# Altium schematic symbol library Centralize.SchLib: 1081 symbols (part 14 of 26)
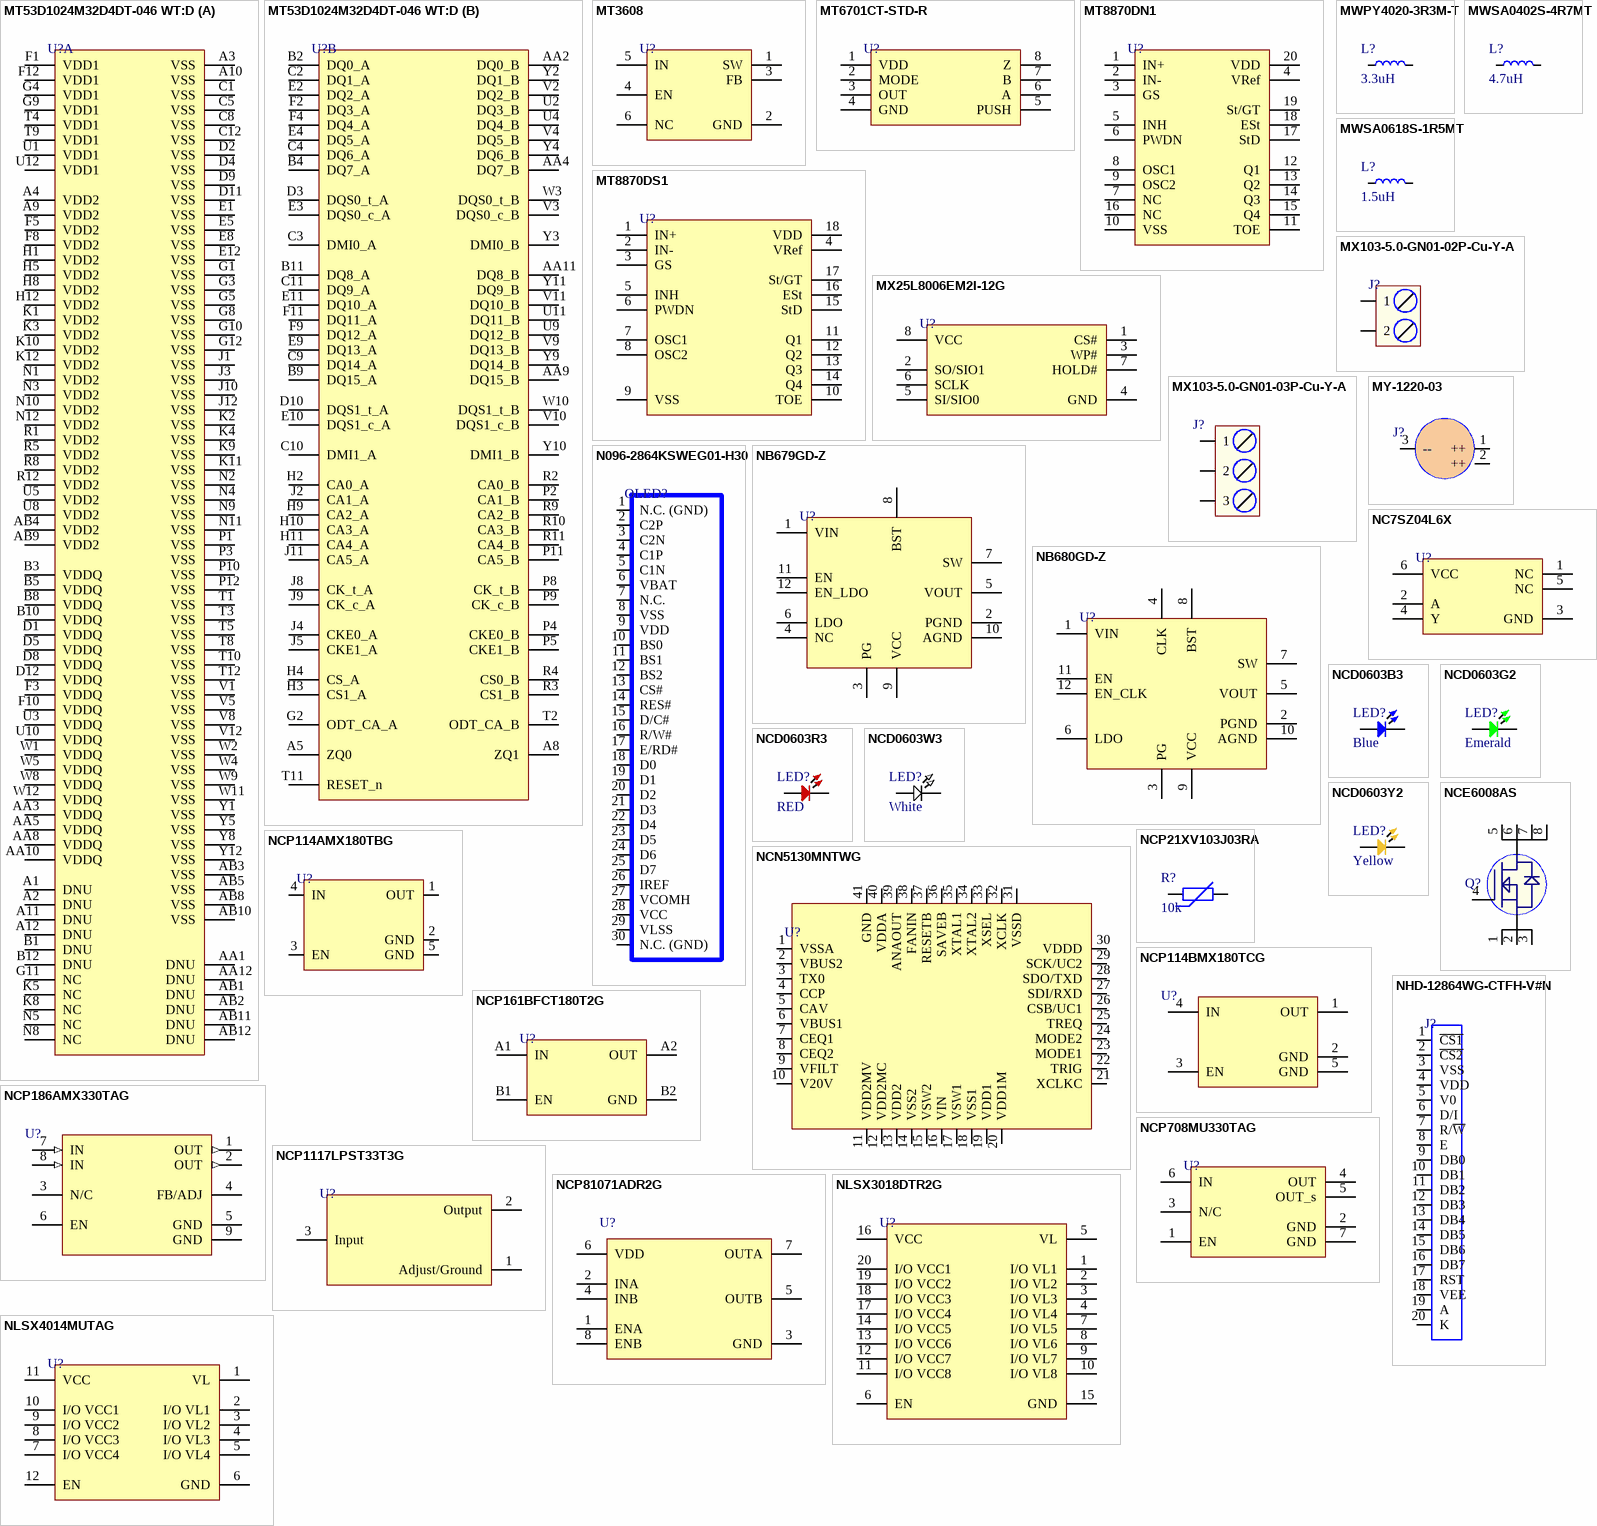
[diagram p60: symbols MT53D1024M32D4DT-046 WT:D to NLSX4014MUTAG]

## NCD0603G2
designator LED?, comment Emerald
Emerald 0603 Light Emitting Diodes (LED) ROHS; Manufacturer: Foshan NationStar Optoelectronics; Manufacturer Part Number: NCD0603G2; Package: 0603; LCSC Part Number: C87326; Item Type: LED; ComponentLink1Description: LCSC; ComponentLink1URL: https://www.lcsc.com/product-detail/Light-Emitting-Diodes-LED_Foshan-NationStar-Optoelectronics-NCD0603G2_C87326.html
footprint LED-0603
pins: 1, 2

## NCD0603R3
designator LED?, comment RED
RED LED 0603 Light Emitting Diodes; Manufacturer: Foshan NationStar Optoelectronics; Manufacturer Part Number: NCD0603R3; Package: 0603; Item Type: LED; LCSC Part Number: C3151730; ComponentLink1Description: LCSC; ComponentLink1URL: https://www.lcsc.com/product-detail/Light-Emitting-Diodes-LED_Foshan-NationStar-Optoelectronics-NCD0603R3_C3151730.html
footprint LED-0603
pins: 1, 2

## NCD0603W3
designator LED?, comment White
White light 0603 Light Emitting Diodes (LED) ROHS; Manufacturer: Foshan NationStar Optoelectronics; Manufacturer Part Number: NCD0603W3; Package: 0603; LCSC Part Number: C158100; Item Type: LED; ComponentLink1Description: LCSC; ComponentLink1URL: https://www.lcsc.com/product-detail/Light-Emitting-Diodes-LED_Foshan-NationStar-Optoelectronics-NCD0603W3_C158100.html
footprint LED-0603
pins: 1, 2

## NCD0603Y2
designator LED?, comment Yellow
yellow 0603 Light Emitting Diodes (LED) ROHS; Manufacturer: Foshan NationStar Optoelectronics; Manufacturer Part Number: NCD0603Y2; Package: 0603; LCSC Part Number: C89811; Item Type: LED; ComponentLink1Description: LCSC; ComponentLink1URL: https://www.lcsc.com/product-detail/Light-Emitting-Diodes-LED_Foshan-NationStar-Optoelectronics-NCD0603Y2_C89811.html
footprint LED-0603
pins: 1, 2

## NCE6008AS
designator Q?
60V 8A 2.1W 20mΩ@10V,8A 2.2V@250uA N Channel SOP-8 MOSFETs ROHS; Manufacturer: Wuxi; Manufacturer Part Number: NCE6008AS; Package: SOP-8; ComponentLink1Description: LCSC; ComponentLink1URL: https://www.lcsc.com/product-detail/MOSFETs_Wuxi-span-style-background-color-ff0-NCE-span-Power-Semiconductor-NCE6008AS_C341716.html; LCSC Part Number: C341716
footprint SOP-8
pins: 1 S, 2 S, 3 S, 4 G, 5 D, 6 D, 7 D, 8 D

## NCN5130MNTWG
designator U?
IC TRANSCEIVER FULL 1/1 40QFN; Manufacturer: ON Semiconductor; Manufacturer Part Number: NCN5130MNTWG; Simplex/Duplex: Full Duplex; Supplier: Mouser; Supplier Part Number: 863-NCN5130MNTWG; RoHS: Yes; Category: Buffers, Drivers and Transceivers; Stock: 36; Pricing: 1=6.82, 10=6.16, 50=5.88, 100=4.78, 1000=3.66, 10000=3.51 (USD); Mounting Technology: Surface Mount; Case/Package: QFN; Min Operating Temperature: -40°C; Max Operating Temperature: 105°C; Packaging: Cut Tape; Series: -; Lead Free: Lead Free; RoHS Compliant: Yes; ComponentLink1URL: http://www.onsemi.com/pub/Collateral/NCN5130-D.PDF?src-supplier=Digi-Key; ComponentLink1Description: http://www.onsemi.com/pub/Collateral/NCN5130-D.PDF?src-supplier=Digi-Key; Item Type: IC
footprint 40-QFN (6x6)
pins: 1 VSSA, 2 VBUS2, 3 TX0, 4 CCP, 5 CAV, 6 VBUS1, 7 CEQ1, 8 CEQ2, 9 VFILT, 10 V20V, 11 VDD2MV, 12 VDD2MC, 13 VDD2, 14 VSS2, 15 VSW2, 16 VIN, 17 VSW1, 18 VSS1, 19 VDD1, 20 VDD1M, 21 XCLKC, 22 TRIG, 23 MODE1, 24 MODE2, 25 TREQ, 26 CSB/UC1, 27 SDI/RXD, 28 SDO/TXD, 29 SCK/UC2, 30 VDDD, 31 VSSD, 32 XCLK, 33 XSEL, 34 XTAL2, 35 XTAL1, 36 SAVEB, 37 RESETB, 38 FANIN, 39 ANAOUT, 40 VDDA, 41 GND

## NCP21XV103J03RA
designator R?, comment 10k
THERMISTOR NTC 10KOHM 3900K 0805; Manufacturer: Murata Electronics; Manufacturer Part Number: NCP21XV103J03RA; Package: 0805; LCSC Part Number: C73681; Item Type: Thermistor; ComponentLink8Description: LCSC; ComponentLink8URL: https://www.lcsc.com/product-detail/NTC-Thermistors_Murata-Electronics-NCP21XV103J03RA_C73681.html
footprint RES-0805 (SMD 0805)
pins: 1, 2

## NCP114AMX180TBG
designator U?
IC REG LINEAR 1.8V 300MA 4UDFN; Manufacturer: ON Semiconductor; Manufacturer Part Number: NCP114AMX180TBG; Number of Regulators: 1; Supplier: Avnet; Supplier Part Number: NCP114AMX180TBG; RoHS: Yes; Category: Voltage Regulators - Linear; Stock: 515000; Pricing: 5939=0.06231, 6000=0.06062, 12000=0.05894, 30000=0.05726, 60000=0.05557, 300000=0.05389, 600000=0.0522 (USD); Mounting Technology: Surface Mount; Case/Package: 300; Min Operating Temperature: -40°C; Max Operating Temperature: 85°C; Packaging: Tape and Reel; Output Voltage: 1.8V; Output Current: 300mA; Min Current Limit: 300mA; Series: -; Lead Free: Lead Free; RoHS Compliant: Yes; ComponentLink1URL: http://www.mouser.com/ds/2/308/NCP114-D-465957.pdf?src-supplier=Mouser; ComponentLink1Description: http://www.mouser.com/ds/2/308/NCP114-D-465957.pdf?src-supplier=Mouser; ComponentLink2URL: https://datasheet.octopart.com/NCP114AMX180TBG-ON-Semiconductor-datasheet-138898170.pdf?src-supplier=Newark; ComponentLink2Description: https://datasheet.octopart.com/NCP114AMX180TBG-ON-Semiconductor-datasheet-138898170.pdf?src-supplier=Newark; ComponentLink3URL: https://datasheet.octopart.com/NCP114AMX180TBG-ON-Semiconductor-datasheet-37176940.pdf?src-supplier=Future+Electronics; ComponentLink3Description: https://datasheet.octopart.com/NCP114AMX180TBG-ON-Semiconductor-datasheet-37176940.pdf?src-supplier=Future+Electronics; ComponentLink4URL: http://www.onsemi.com/pub/Collateral/NCP114-D.PDF?src-supplier=Digi-Key; ComponentLink4Description: http://www.onsemi.com/pub/Collateral/NCP114-D.PDF?src-supplier=Digi-Key; ComponentLink5URL: https://datasheet.octopart.com/NCP114AMX180TBG-onsemi-datasheet-66421349.pdf?src-supplier=SHENGYU+ELECTRONICS; ComponentLink5Description: https://datasheet.octopart.com/NCP114AMX180TBG-onsemi-datasheet-66421349.pdf?src-supplier=SHENGYU+ELECTRONICS; LCSC Part Number: C457784; Item Type: IC
footprint 4-UDFN (1.0x1.0)
pins: 1 OUT, 2 GND, 3 EN, 4 IN, 5 GND

## NCP114BMX180TCG
designator U?
IC REG LINEAR 1.8V 300MA 4UDFN; Manufacturer: ON Semiconductor; Manufacturer Part Number: NCP114BMX180TCG; Number of Outputs: 1; Min Input Voltage: 1.7V; Max Input Voltage: 5.5V; Polarity: Positive; Quiescent Current: 95uA; Accuracy: 1%; Output Type: Fixed; Supplier 1: Digi-Key; Stock 1: 6054; Pricing 1: 1=0.43, 10=0.321, 25=0.2804, 100=0.1815, 250=0.15024, 500=0.1202, 1000=0.09216 (USD); Mount: Surface Mount; Number of Pins: 4; Min Operating Temperature: -40°C; Max Operating Temperature: 85°C; Packaging: Tape and Reel; Max Output Current: 300mA; Output Voltage: 1.8V; Output Current: 300mA; Number of Regulators: 1; Min Current Limit: 300mA; Package Quantity: 3000; Radiation Hardening: No; Lead Free: Lead Free; RoHS Compliant: Yes; ComponentLink1URL: http://www.onsemi.com/pub/Collateral/NCP114-D.PDF?src-supplier=Avnet; ComponentLink1Description: http://www.onsemi.com/pub/Collateral/NCP114-D.PDF?src-supplier=Avnet; Supplier Part Number 1: NCP114BMX180TCGOSCT-ND; LCSC Part Number: C457759; Item Type: IC
footprint 4-UDFN (1.0x1.0)
pins: 1 OUT, 2 GND, 3 EN, 4 IN, 5 GND

## NCP161BFCT180T2G
designator U?
IC REG LINEAR 1.8V 450MA 4WLCSP; Manufacturer: ON Semiconductor; Manufacturer Part Number: NCP161BFCT180T2G; Number of Outputs: 1; Min Input Voltage: 1.9V; Max Input Voltage: 5.5V; Dropout Voltage: 300mV; Polarity: Positive; Quiescent Current: 23uA; Accuracy: 2%; Output Type: Fixed; Supplier 1: Digi-Key; RoHS: Yes; Category: Voltage Regulators - Linear; Stock 1: 1173; Pricing 1: 1=0.38000, 10=0.30900, 25=0.28320, 100=0.21060, 250=0.19088, 500=0.15798, 1000=0.11849, 2500=0.10868 (USD); Mount: Surface Mount; Number of Pins: 4; Weight: 0.002413oz; Min Operating Temperature: -40°C; Max Operating Temperature: 125°C; Max Output Current: 450mA; Output Voltage: 1.8V; Packaging: Tape and Reel; Output Current: 450mA; Number of Regulators: 1; Min Current Limit: 450mA; Package Quantity: 5000; Lead Free: Lead Free; RoHS Compliant: Yes; ComponentLink1URL: http://www.mouser.com/ds/2/308/NCP161-D-466765.pdf?src-supplier=Mouser; ComponentLink1Description: http://www.mouser.com/ds/2/308/NCP161-D-466765.pdf?src-supplier=Mouser; ComponentLink2URL: https://www.onsemi.com/pub/Collateral/NCP161-D.PDF?src-supplier=Digi-Key; ComponentLink2Description: https://www.onsemi.com/pub/Collateral/NCP161-D.PDF?src-supplier=Digi-Key; ComponentLink3URL: http://www.onsemi.com/pub/Collateral/NCP161-D.PDF?src-supplier=Digi-Key; ComponentLink3Description: http://www.onsemi.com/pub/Collateral/NCP161-D.PDF?src-supplier=Digi-Key; ComponentLink4URL: http://www.onsemi.com/pub/Collateral/NCP161-D.PDF?src-supplier=Avnet; ComponentLink4Description: http://www.onsemi.com/pub/Collateral/NCP161-D.PDF?src-supplier=Avnet; Supplier Part Number 1: NCP161BFCT180T2GOSCT-ND; LCSC Part Number: C464042; Item Type: IC
footprint 4-WLCSP (0.64x0.64)
pins: A1 IN, A2 OUT, B1 EN, B2 GND

## NCP186AMX330TAG
designator U?
IC REG LINEAR 3.3V 1A 8XDFN; Manufacturer: ON Semiconductor; Manufacturer Part Number: NCP186AMX330TAG; Dropout Voltage: 95mV; Number of Regulators: 1; Min Current Limit: 1.1A; Supplier 1: Digi-Key; Stock 1: 5995; Pricing 1: 1=0.48, 10=0.39, 25=0.3564, 100=0.2405, 250=0.199, 500=0.18242, 1000=0.13682 (USD); Mount: Surface Mount; Number of Pins: 8; Min Operating Temperature: -40°C; Max Operating Temperature: 125°C; Packaging: Tape and Reel; Output Voltage: 3.3V; Output Current: 1A; Lead Free: Lead Free; ComponentLink1URL: http://www.farnell.com/datasheets/2236905.pdf?src-supplier=Farnell; ComponentLink1Description: http://www.farnell.com/datasheets/2236905.pdf?src-supplier=Farnell; ComponentLink2URL: http://www.farnell.com/datasheets/2236905.pdf?src-supplier=Newark; ComponentLink2Description: http://www.farnell.com/datasheets/2236905.pdf?src-supplier=Newark; ComponentLink3URL: http://www.onsemi.com/pub/Collateral/NCP186-D.PDF?src-supplier=Digi-Key; ComponentLink3Description: http://www.onsemi.com/pub/Collateral/NCP186-D.PDF?src-supplier=Digi-Key; ComponentLink4URL: https://www.onsemi.com/pub/Collateral/NCP186-D.PDF?src-supplier=Digi-Key; ComponentLink4Description: https://www.onsemi.com/pub/Collateral/NCP186-D.PDF?src-supplier=Digi-Key; Supplier Part Number 1: NCP186AMX330TAGOSCT-ND; LCSC Part Number: C719823; Item Type: IC
footprint 8-XDFN (1.6x1.2)
pins: 1 OUT (out), 2 OUT (out), 3 N/C, 4 FB/ADJ, 5 GND (power), 6 EN, 7 IN (in), 8 IN (in), 9 GND (power)

## NCP708MU330TAG
designator U?
IC REG LINEAR 3.3V 1A 6UDFN; Manufacturer: ON Semiconductor; Manufacturer Part Number: NCP708MU330TAG; Dropout Voltage: 220mV; Number of Regulators: 1; Min Current Limit: 1.1A; Supplier 1: Digi-Key; RoHS: Yes; Category: Voltage Regulators - Linear; Stock 1: 3000; Pricing 1: 1=0.51000, 10=0.43500, 25=0.40600, 100=0.32470, 250=0.30152, 500=0.25512, 1000=0.19714 (USD); Mount: Surface Mount; Min Operating Temperature: -40°C; Max Operating Temperature: 125°C; Packaging: Tape and Reel; Output Voltage: 3.3V; Output Current: 1A; Lead Free: Lead Free; RoHS Compliant: Yes; ComponentLink1URL: http://www.mouser.com/ds/2/308/NCP708-D-1082570.pdf?src-supplier=Mouser; ComponentLink1Description: http://www.mouser.com/ds/2/308/NCP708-D-1082570.pdf?src-supplier=Mouser; ComponentLink2URL: http://www.onsemi.com/pub/Collateral/NCP708-D.PDF?src-supplier=Digi-Key; ComponentLink2Description: http://www.onsemi.com/pub/Collateral/NCP708-D.PDF?src-supplier=Digi-Key; Supplier Part Number 1: NCP708MU330TAGOSCT-ND; LCSC Part Number: C183178; Item Type: IC
footprint 6-UDFN (3x3)
pins: 1 EN, 2 GND, 3 N/C, 4 OUT, 5 OUT_s, 6 IN, 7 GND

## NCP1117LPST33T3G
designator U?
IC REG LINEAR 3.3V 1A SOT223; Manufacturer: ON Semiconductor; Manufacturer Part Number: NCP1117LPST33T3G; Dropout Voltage: 1.3V; Number of Outputs: 1; Min Input Voltage: -300mV; Max Input Voltage: 18V; Min Current Limit: 1.1A; Quiescent Current: 700uA; Reference Voltage: 1.275V; Polarity: Positive; Power Supply Rejection Ratio (PSRR): 60dB; Output Type: Fixed; Supplier 1: Digi-Key; RoHS: Yes; Category: Voltage Regulators - Linear; Stock 1: 2017; Pricing 1: 1=0.44000, 10=0.37400, 25=0.34920, 100=0.27930, 250=0.25932, 500=0.21944, 1000=0.16957 (USD); Mount: Surface Mount; Case/Package: SOT-223; Number of Pins: 3; Contact Plating: Tin,Matte; Min Operating Temperature: 0°C; Max Operating Temperature: 125°C; Packaging: Tape and Reel; Output Voltage: 3.3V; Package Quantity: 1; Max Output Current: 1A; Output Current: 1A; Number of Regulators: 1; Min Output Voltage: 3.3V; Nominal Output Voltage: 3.3V; Series: -; Length: 6.7mm; Width: 3.7mm; Height: 1.69mm; REACH SVHC: No SVHC; Lead Free: Lead Free; Halogen Free: Halogen Free; RoHS Compliant: Yes; ComponentLink1URL: https://datasheet.ciiva.com/6590/ncp1117lp-d-6590870.pdf?src-supplier=Digi-Key; ComponentLink1Description: https://datasheet.ciiva.com/6590/ncp1117lp-d-6590870.pdf?src-supplier=Digi-Key; ComponentLink2URL: https://datasheet.ciiva.com/16468/ncp1117lp-d-16468566.pdf?src-supplier=Future+Electronics; ComponentLink2Description: https://datasheet.ciiva.com/16468/ncp1117lp-d-16468566.pdf?src-supplier=Future+Electronics; ComponentLink3URL: https://datasheet.ciiva.com/6590/ncp1117lp-d-6590872.pdf?src-supplier=Digi-Key; ComponentLink3Description: https://datasheet.ciiva.com/6590/ncp1117lp-d-6590872.pdf?src-supplier=Digi-Key; ComponentLink4URL: https://datasheet.ciiva.com/6590/ncp1117lp-d-6590873.pdf?src-supplier=Digi-Key; ComponentLink4Description: https://datasheet.ciiva.com/6590/ncp1117lp-d-6590873.pdf?src-supplier=Digi-Key; ComponentLink5URL: https://datasheet.ciiva.com/8233/ncp1117lp-d-8233561.pdf?src-supplier=Avnet; ComponentLink5Description: https://datasheet.ciiva.com/8233/ncp1117lp-d-8233561.pdf?src-supplier=Avnet; ComponentLink6URL: https://datasheet.ciiva.com/8231/ncp1117lp-d-8231034.pdf?src-supplier=Avnet; ComponentLink6Description: https://datasheet.ciiva.com/8231/ncp1117lp-d-8231034.pdf?src-supplier=Avnet; ComponentLink7URL: https://datasheet.ciiva.com/4887/ncp1117lp-d-82673-4887580.pdf?src-supplier=Mouser; ComponentLink7Description: https://datasheet.ciiva.com/4887/ncp1117lp-d-82673-4887580.pdf?src-supplier=Mouser; Supplier Part Number 1: NCP1117LPST33T3GOSCT-ND; LCSC Part Number: C146799; Item Type: IC
footprint SOT- 223
pins: 1 Adjust/Ground, 2 Output, 3 Input

## NCP81071ADR2G
designator U?
IC GATE DRVR LOW-SIDE 8SOIC; Manufacturer: ON Semiconductor; Manufacturer Part Number: NCP81071ADR2G; Number of Outputs: 2; Max Supply Voltage: 20V; Min Supply Voltage: 4.5V; Max Output current: 5A; Channel Type: Independent; Max Supply Current: 3mA; Item Type: IC; Supplier 1: Arrow Electronics; RoHS: Yes; Category: Gate Drivers; Stock 1: 2500; Pricing 1: 1=1.54550, 10=1.37660, 25=1.29600, 100=1.05960, 250=0.98200, 500=0.86120, 1000=0.67570 (USD); Mounting Technology: Surface Mount; Case/Package: SOIC; Pins: 8; Min Operating Temperature: -40°C; Max Operating Temperature: 140°C; Packaging: Cut Tape; Number of Drivers: 2; Series: -; Length: 5mm; Width: 4mm; Height: 1.5mm; Reach SVHC Compliant: Yes; Lead Free: Lead Free; RoHS Compliant: Yes; ComponentLink1URL: https://datasheet.ciiva.com/48511/ncp81071-d-48511319.pdf?src-supplier=Avnet; ComponentLink1Description: https://datasheet.ciiva.com/48511/ncp81071-d-48511319.pdf?src-supplier=Avnet; Supplier Part Number 1: NCP81071ADR2G
footprint SOIC-8
pins: 1 ENA, 2 INA, 3 GND, 4 INB, 5 OUTB, 6 VDD, 7 OUTA, 8 ENB

## NHD-12864WG-CTFH-V#N
designator J?
2.54mm Plugin Brass Straight 1x20P 20 Plugin,P=2.54mm Female Headers ROHS; Manufacturer: Ckmtw(Shenzhen Cankemeng); Manufacturer Part Number: B-2200S20P-A120; Item Type: Header; Package: Plugin,P=2.54mm; LCSC Part Number: C124410; ComponentLink1Description: LCSC; ComponentLink1URL: https://www.lcsc.com/product-detail/span-style-background-color-ff0-Female-span-Headers_Ckmtw-Shenzhen-Cankemeng-B-2200S20P-A120_C124410.html
footprint NHD-12864WG-CTFH-V#N
pins: 1 ~{CS1}, 2 ~{CS2}, 3 VSS, 4 VDD, 5 V0, 6 D/I, 7 R/~{W}, 8 E, 9 DB0, 10 DB1, 11 DB2, 12 DB3, 13 DB4, 14 DB5, 15 DB6, 16 DB7, 17 RST, 18 VEE, 19 A, 20 K

## NLSX3018DTR2G
designator U?
IC TRNSLTR BIDIRECTIONAL 20TSSOP; Manufacturer: ON Semiconductor; Manufacturer Part Number: NLSX3018DTR2G; Data Rate: 110Mbps; Number of Channels: 8; Propagation Delay: 6.5ns; Max Supply Voltage: 5.5V; Min Supply Voltage: -500mV; Logic Function: Translator; Turn-On Delay Time: 160ns; Low Level Output Current: 20uA; High Level Output Current: -20uA; Output Type: Voltage; Supplier 1: Digi-Key; RoHS: Yes; Category: Voltage Level Shifters; Stock 1: 2878; Pricing 1: 1=2.04000, 10=1.82900, 25=1.72520, 100=1.46980, 250=1.38012, 500=1.20760, 1000=1.13925 (USD); Mount: Surface Mount; Case/Package: TSSOP; Number of Pins: 20; Min Operating Temperature: -40°C; Max Operating Temperature: 85°C; Packaging: Tape and Reel; Package Quantity: 2500; Number of Bits: 8; Series: -; Lead Free: Lead Free; Halogen Free: Halogen Free; RoHS Compliant: Yes; ComponentLink1URL: https://datasheet.ciiva.com/8246/nlsx3018-d-8246180.pdf?src-supplier=Avnet; ComponentLink1Description: https://datasheet.ciiva.com/8246/nlsx3018-d-8246180.pdf?src-supplier=Avnet; ComponentLink2URL: https://datasheet.ciiva.com/1900/nlsx3018-d-1900882.pdf?src-supplier=Digi-Key; ComponentLink2Description: https://datasheet.ciiva.com/1900/nlsx3018-d-1900882.pdf?src-supplier=Digi-Key; Supplier Part Number 1: NLSX3018DTR2GOSCT-ND; LCSC Part Number: C463618; Item Type: IC
footprint TSSOP-20
pins: 1 I/O VL1, 2 I/O VL2, 3 I/O VL3, 4 I/O VL4, 5 VL, 6 EN, 7 I/O VL5, 8 I/O VL6, 9 I/O VL7, 10 I/O VL8, 11 I/O VCC8, 12 I/O VCC7, 13 I/O VCC6, 14 I/O VCC5, 15 GND, 16 VCC, 17 I/O VCC4, 18 I/O VCC3, 19 I/O VCC2, 20 I/O VCC1

## NLSX4014MUTAG
designator U?
IC TRNSLTR BIDIRECTIONAL 12UQFN; Manufacturer: ON Semiconductor; Manufacturer Part Number: NLSX4014MUTAG; Data Rate: 140Mbps; Number of Channels: 4; Propagation Delay: 250ns; Max Supply Voltage: 4.5V; Min Supply Voltage: 900mV; Logic Function: Translator,Level Shifter; Turn-On Delay Time: 9.3ns; High Level Output Current: -20uA; Low Level Output Current: 20uA; Quiescent Current: 2uA; Output Type: Voltage,3-STATE; Supplier 1: Avnet; RoHS: Yes; Category: Voltage Level Shifters; Stock 1: 64196; Pricing 1: 621=0.58061, 630=0.56448, 1300=0.54835, 3200=0.53222, 6300=0.51610, 32000=0.49997, 63000=0.48384, 3000=0.57600, 6000=0.56064, 12000=0.54528, 18000=0.52992, 24000=0.51456 (USD); Mount: Surface Mount; Number of Pins: 12; Min Operating Temperature: -40°C; Max Operating Temperature: 85°C; Packaging: Tape and Reel; Package Quantity: 1; Number of Bits: 4; Output Current: 20uA; Series: -; Radiation Hardening: No; Lead Free: Lead Free; Halogen Free: Halogen Free; RoHS Compliant: Yes; ComponentLink1URL: https://datasheet.ciiva.com/1900/nlsx4014-d-1900788.pdf?src-supplier=Digi-Key; ComponentLink1Description: https://datasheet.ciiva.com/1900/nlsx4014-d-1900788.pdf?src-supplier=Digi-Key; ComponentLink2URL: https://datasheet.ciiva.com/26907/getdatasheetpartid-78427-26907952.pdf?src-supplier=Verical; ComponentLink2Description: https://datasheet.ciiva.com/26907/getdatasheetpartid-78427-26907952.pdf?src-supplier=Verical; ComponentLink3URL: https://datasheet.ciiva.com/8246/nlsx4014-d-8246219.pdf?src-supplier=Avnet; ComponentLink3Description: https://datasheet.ciiva.com/8246/nlsx4014-d-8246219.pdf?src-supplier=Avnet; ComponentLink4URL: https://datasheet.ciiva.com/1900/nlsx4014-d-1900789.pdf?src-supplier=Digi-Key; ComponentLink4Description: https://datasheet.ciiva.com/1900/nlsx4014-d-1900789.pdf?src-supplier=Digi-Key; ComponentLink5URL: https://datasheet.ciiva.com/1900/nlsx4014-d-1900790.pdf?src-supplier=Digi-Key; ComponentLink5Description: https://datasheet.ciiva.com/1900/nlsx4014-d-1900790.pdf?src-supplier=Digi-Key; ComponentLink6URL: https://datasheet.ciiva.com/26041/nlsx4014-d-26041242.pdf?src-supplier=Avnet+Europe; ComponentLink6Description: https://datasheet.ciiva.com/26041/nlsx4014-d-26041242.pdf?src-supplier=Avnet+Europe; ComponentLink7URL: https://datasheet.ciiva.com/16470/nlsx4014-d-16470827.pdf?src-supplier=Future+Electronics; ComponentLink7Description: https://datasheet.ciiva.com/16470/nlsx4014-d-16470827.pdf?src-supplier=Future+Electronics; Supplier Part Number 1: NLSX4014MUTAG; LCSC Part Number: C462934; Item Type: IC
footprint 12-UQFN (1.7x2)
pins: 1 VL, 2 I/O VL1, 3 I/O VL2, 4 I/O VL3, 5 I/O VL4, 6 GND, 7 I/O VCC4, 8 I/O VCC3, 9 I/O VCC2, 10 I/O VCC1, 11 VCC, 12 EN

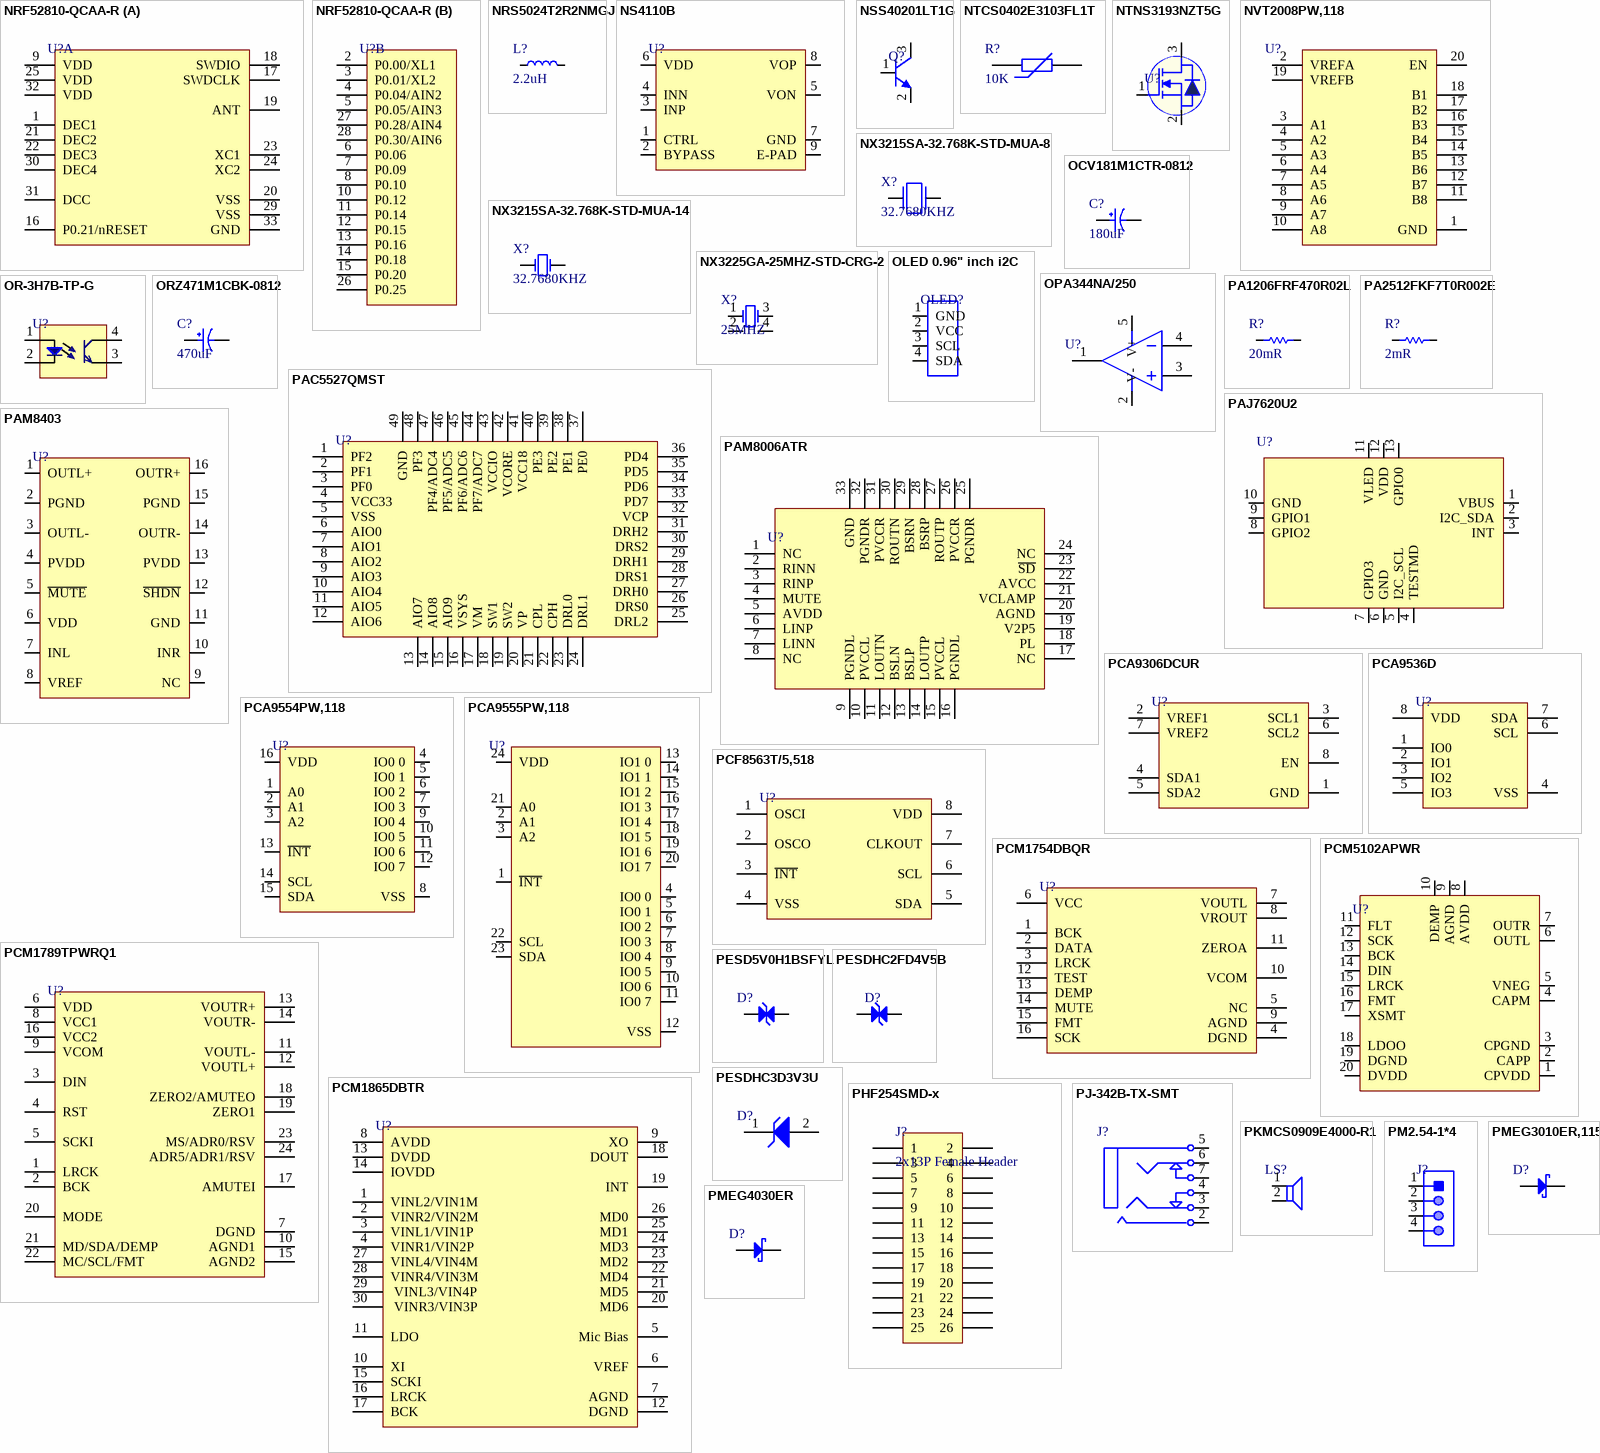
[diagram p18: symbols NRF52810-QCAA-R to PMEG4030ER]

## NRF52810-QCAA-R
designator U?
IC RF TXRX+MCU BLUETOOTH 32WFQFN; Manufacturer: Nordic Semiconductor; Manufacturer Part Number: NRF52810-QCAA-R; Supplier 1: Digi-Key; RoHS: Yes; Category: RF Receivers, Transceivers; Stock 1: 2906; Pricing 1: 1=3.54000, 10=3.16200, 25=2.84640, 100=2.59320, 250=2.34024, 500=2.09990, 1000=1.77100 (USD); RoHS Compliant: Yes; Supplier Part Number 1: 1490-NRF52810-QCAA-RCT-ND; LCSC Part Number: C519278
footprint 32-QFN (32pins, 5x5mm body, 0.5mm pitch QFN package)
part A pins: 1 DEC1, 9 VDD, 16 P0.21/nRESET, 17 SWDCLK, 18 SWDIO, 19 ANT, 20 VSS, 21 DEC2, 22 DEC3, 23 XC1, 24 XC2, 25 VDD, 29 VSS, 30 DEC4, 31 DCC, 32 VDD, 33 GND
part B pins: 2 P0.00/XL1, 3 P0.01/XL2, 4 P0.04/AIN2, 5 P0.05/AIN3, 6 P0.06, 7 P0.09, 8 P0.10, 10 P0.12, 11 P0.14, 12 P0.15, 13 P0.16, 14 P0.18, 15 P0.20, 26 P0.25, 27 P0.28/AIN4, 28 P0.30/AIN6

## NRS5024T2R2NMGJ
designator L?, comment 2.2uH
FIXED IND 2.2UH 3.1A 29 MOHM SMD; Manufacturer: Taiyo Yuden; Manufacturer Part Number: NRS5024T2R2NMGJ; Core Material: Ferrite; Saturation Current: 4.1A; Shielding: Shielded; DC Resistance (DCR): 29mR; Self Resonant Frequency: 51MHz; Test Frequency: 100kHz; Tolerance: 30%; Item Type: Inductor; Supplier: Digi-Key; Supplier Part Number: 587-6102-1-ND; RoHS: Yes; Category: Fixed Inductors; Stock: 19904; Pricing: 1=0.28, 10=0.247, 25=0.212, 50=0.1944, 100=0.1768, 250=0.16616, 500=0.14848, 1000=0.12019 (USD); Mounting Technology: Surface Mount; Case/Package: Nonstandard; Min Operating Temperature: -25°C; Max Operating Temperature: 120°C; Packaging: Tape and Reel; Resistor Type: Wirewound; Value: 2.2uH; Current Rating: 3.1A; Length: 0.193inch; Width: 0.193inch; Height - Seated (Max): 0.094inch; RoHS Compliant: Yes; ComponentLink1URL: https://datasheet.octopart.com/NRS5024T2R2NMGJ-Taiyo-Yuden-datasheet-99833426.pdf?src-supplier=Future+Electronics; ComponentLink1Description: https://datasheet.octopart.com/NRS5024T2R2NMGJ-Taiyo-Yuden-datasheet-99833426.pdf?src-supplier=Future+Electronics; ComponentLink2URL: http://ds.yuden.co.jp/TYCOMPAS/ut/detail.do?productNo=NRS5024T2R2NMGJ&fileName=NRS5024T2R2NMGJ_SS&mode=specSheetDownload&src-supplier=Digi-Key; ComponentLink2Description: http://ds.yuden.co.jp/TYCOMPAS/ut/detail.do?productNo=NRS5024T2R2NMGJ&fileName=NRS5024T2R2NMGJ_SS&mode=specSheetDownload&src-supplier=Digi-Key; ComponentLink3URL: https://ds.yuden.co.jp/TYCOMPAS/ut/detail?pn=NRS5024T2R2NMGJ  &amp;u=M&src-supplier=Digi-Key; ComponentLink3Description: https://ds.yuden.co.jp/TYCOMPAS/ut/detail?pn=NRS5024T2R2NMGJ  &amp;u=M&src-supplier=Digi-Key; LCSC Part Number: C222926
footprint NRS5024T2R2NMGJ
pins: 1, 2

## NS4110B
designator U?
SOP-8-EP Audio Power OpAmps ROHS; Manufacturer: Shenzhen Nsiway Tech; Manufacturer Part Number: NS4110B; Item Type: IC; Package: SOP-8-EP; LCSC Part Number: C5334145; ComponentLink1Description: LCSC; ComponentLink1URL: https://www.lcsc.com/product-detail/Audio-Power-OpAmps_Shenzhen-Nsiway-Tech-NS4110B_C5334145.html
footprint 8-SOIC-EP
pins: 1 CTRL, 2 BYPASS, 3 INP, 4 INN, 5 VON, 6 VDD, 7 GND, 8 VOP, 9 E-PAD

## NSS40201LT1G
designator Q?
TRANS NPN 40V 2A SOT23-3; Manufacturer: ON Semiconductor; Manufacturer Part Number: NSS40201LT1G; Max Power Dissipation: 540mW; Transition Frequency: 150MHz; hFE Min: 200; Number of Elements: 1; Emitter Base Voltage (VEBO): 6V; Collector Emitter Saturation Voltage: 115mV; Element Configuration: Single; Clock Frequency: 100MHz; Item Type: Transistor; Supplier 1: Future Electronics; RoHS: Yes; Category: BJTs; Stock 1: 155; Pricing 1: 1=0.42000, 15=0.34000, 75=0.29500, 300=0.25500, 1500=0.21000 (USD); Case/Package: SOT-23-3; Pins: 3; Min Operating Temperature: -55°C; Max Operating Temperature: 150°C; Collector Emitter Voltage (VCEO): 40V; Packaging: Tape and Reel; Max Collector Current: 2A; Collector Emitter Breakdown Voltage: 40V; Polarity: NPN; Package Quantity: 3000; Frequency: 150MHz; Max Breakdown Voltage: 40V; Collector Base Voltage (VCBO): 40V; Power Dissipation: 540mW; Gain Bandwidth Product: 150MHz; Series: -; Collector-emitter Voltage-Max: 115mV; Length: 3.04mm; Width: 2.64mm; Height: 1.11mm; Radiation Hardening: No; Lead Free: Lead Free; Reach SVHC Compliant: Yes; Halogen Free: Halogen Free; RoHS Compliant: Yes; ComponentLink1URL: https://datasheet.ciiva.com/976/nss40201l-d-976800.pdf?src-supplier=Digi-Key; ComponentLink1Description: https://datasheet.ciiva.com/976/nss40201l-d-976800.pdf?src-supplier=Digi-Key; ComponentLink2URL: https://datasheet.ciiva.com/11204/nss40201l-d-11204882.pdf?src-supplier=Avnet; ComponentLink2Description: https://datasheet.ciiva.com/11204/nss40201l-d-11204882.pdf?src-supplier=Avnet; ComponentLink3URL: https://datasheet.ciiva.com/16291/nss40201l-d-115376-16291797.pdf?src-supplier=Mouser; ComponentLink3Description: https://datasheet.ciiva.com/16291/nss40201l-d-115376-16291797.pdf?src-supplier=Mouser; ComponentLink4URL: https://datasheet.ciiva.com/30480/0900766b8121b5a5-30480502.pdf?src-supplier=Rs; ComponentLink4Description: https://datasheet.ciiva.com/30480/0900766b8121b5a5-30480502.pdf?src-supplier=Rs; ComponentLink5URL: https://datasheet.ciiva.com/976/nss40201l-d-976801.pdf?src-supplier=Digi-Key; ComponentLink5Description: https://datasheet.ciiva.com/976/nss40201l-d-976801.pdf?src-supplier=Digi-Key; ComponentLink6URL: https://datasheet.ciiva.com/976/nss40201l-d-976802.pdf?src-supplier=Digi-Key; ComponentLink6Description: https://datasheet.ciiva.com/976/nss40201l-d-976802.pdf?src-supplier=Digi-Key; ComponentLink7URL: https://datasheet.ciiva.com/22641/nss40201l-d-22641179.pdf?src-supplier=Farnell; ComponentLink7Description: https://datasheet.ciiva.com/22641/nss40201l-d-22641179.pdf?src-supplier=Farnell; ComponentLink8URL: https://datasheet.ciiva.com/16222/nss40201l-d-16222093.pdf?src-supplier=Future+Electronics; ComponentLink8Description: https://datasheet.ciiva.com/16222/nss40201l-d-16222093.pdf?src-supplier=Future+Electronics; Supplier Part Number 1: 6030674; LCSC Part Number: C145175
footprint SOT-23 (TRANS NPN 40V 0.6A SOT23)
pins: 1 B, 2 E, 3 C

## NTCS0402E3103FL1T
designator R?, comment 10K
NTC SMD 0402 NISN 10K 1% LOW B 1; Manufacturer: Vishay; Manufacturer Part Number: NTCS0402E3103FL1T; Item Type: Thermistor; Supplier 1: Mouser; RoHS: Yes; Category: Thermistors; Stock 1: 56029; Pricing 1: 1=0.51000, 10=0.38800, 50=0.32200, 100=0.27400, 1000=0.20900, 10000=0.17100 (USD); Supplier Part Number 1: 594-NTS0402E3103FL1T; LCSC Part Number: C3153804; ComponentLink1Description: LCSC; ComponentLink1URL: https://lcsc.com/product-detail/span-style-background-color-ff0-NTC-span-Thermistors_Vishay-Intertech-NTCS0402E3103FL1T_C3153804.html
footprint Res-0402
pins: 1, 2

## NTNS3193NZT5G
designator U?
MOSFET N-CH 20V 224MA 3XLLGA; Manufacturer: ON Semiconductor; Manufacturer Part Number: NTNS3193NZT5G; Item Type: IC; Supplier: Avnet; Supplier Part Number: NTNS3193NZT5G; RoHS: Yes; Category: MOSFETs; Stock: 720374; Pricing: 1405=0.26344, 1500=0.25632, 2900=0.2492, 7100=0.24208, 15000=0.23496, 71000=0.22784, 150000=0.22072 (USD); ComponentLink1URL: https://datasheet.ciiva.com/24010/ntns3193nz-d-260351-24010388.pdf?src-supplier=Mouser; ComponentLink1Description: https://datasheet.ciiva.com/24010/ntns3193nz-d-260351-24010388.pdf?src-supplier=Mouser; ComponentLink2URL: https://datasheet.ciiva.com/30022/ntns3193nz-d-30022416.pdf?src-supplier=Avnet; ComponentLink2Description: https://datasheet.ciiva.com/30022/ntns3193nz-d-30022416.pdf?src-supplier=Avnet; LCSC Part Number: C179628
footprint X-LLGA-3
pins: 1 G, 2 S, 3 D

## NVT2008PW,118
designator U?
IC TRNSLTR BIDIRECTIONAL 20TSSOP; Manufacturer: NXP Semiconductors; Manufacturer Part Number: NVT2008PW,118; Logic Function: Translator; Number of Channels: 8; Propagation Delay: 1.5ns; Max Supply Voltage: 5.5V; Min Supply Voltage: 1V; Output Type: Voltage; Operating Frequency-Max: 33MHz; Supplier 1: Digi-Key; Stock 1: 4010; Pricing 1: 1=0.94, 10=0.845, 25=0.8016, 100=0.7772 (USD); Mount: Surface Mount; Case/Package: TSSOP; Number of Pins: 20; Min Operating Temperature: -40°C; Max Operating Temperature: 85°C; Packaging: Tape and Reel; Package Quantity: 1; Number of Bits: 8; Turn-On Delay Time: 1.5ns; Series: -; Radiation Hardening: No; Lead Free: Lead Free; RoHS Compliant: Yes; ComponentLink1URL: https://www.nxp.com/docs/en/data-sheet/NVT2008_NVT2010.pdf?src-supplier=Digi-Key; ComponentLink1Description: https://www.nxp.com/docs/en/data-sheet/NVT2008_NVT2010.pdf?src-supplier=Digi-Key; ComponentLink2URL: http://www.nxp.com/documents/data_sheet/NVT2008_NVT2010.pdf?src-supplier=Digi-Key; ComponentLink2Description: http://www.nxp.com/documents/data_sheet/NVT2008_NVT2010.pdf?src-supplier=Digi-Key; ComponentLink3URL: http://ics.nxp.com/interface/to/documents/data_sheet/NVT2008_NVT2010.pdf?src-supplier=Avnet; ComponentLink3Description: http://ics.nxp.com/interface/to/documents/data_sheet/NVT2008_NVT2010.pdf?src-supplier=Avnet; ComponentLink4URL: http://www.nxp.com/documents/data_sheet/NVT2008_NVT2010.pdf?src-supplier=Future+Electronics; ComponentLink4Description: http://www.nxp.com/documents/data_sheet/NVT2008_NVT2010.pdf?src-supplier=Future+Electronics; ComponentLink5URL: http://ics.nxp.com/interface/to/documents/data_sheet/NVT2008_NVT2010.pdf?src-supplier=Avnet+Europe; ComponentLink5Description: http://ics.nxp.com/interface/to/documents/data_sheet/NVT2008_NVT2010.pdf?src-supplier=Avnet+Europe; Supplier Part Number 1: 568-5297-1-ND; LCSC Part Number: C2677387; Item Type: IC
footprint TSSOP-20
pins: 1 GND, 2 VREFA, 3 A1, 4 A2, 5 A3, 6 A4, 7 A5, 8 A6, 9 A7, 10 A8, 11 B8, 12 B7, 13 B6, 14 B5, 15 B4, 16 B3, 17 B2, 18 B1, 19 VREFB, 20 EN

## NX3215SA-32.768K-STD-MUA-8
designator X?, comment 32.7680KHZ
CRYSTAL 32.7680KHZ 12.5PF SMD; Manufacturer: NDK; Manufacturer Part Number: NX3215SA-32.768K-STD-MUA-8; Frequency: 32.768kHz; Frequency Tolerance: 20ppm; ESR (Equivalent Series Resistance): 70kR; Supplier 1: Digi-Key; Stock 1: 29951; Pricing 1: 1=0.68, 10=0.602, 50=0.5628, 100=0.4974, 500=0.47124, 1000=0.3927 (USD); Mount: Surface Mount; Case/Package: SMD/SMT; Number of Pins: 2; Min Operating Temperature: -40°C; Max Operating Temperature: 85°C; Package Quantity: 1000; Load Capacitance: 12.5pF; Packaging: Tape and Reel; Length: 0.126inch; Height: 0.035inch; Width: 0.059inch; Lead Free: Lead Free; ComponentLink1URL: https://media.digikey.com/pdf/Data%20Sheets/NDK%20PDFs/NX3215SA-32.768K-STD-MUA-8.pdf?src-supplier=Digi-Key; ComponentLink1Description: https://media.digikey.com/pdf/Data%20Sheets/NDK%20PDFs/NX3215SA-32.768K-STD-MUA-8.pdf?src-supplier=Digi-Key; ComponentLink2URL: http://www.ndk.com/images/products/catalog/c_NX3215SA-STD-MUA-14_e.pdf?src-supplier=Digi-Key; ComponentLink2Description: http://www.ndk.com/images/products/catalog/c_NX3215SA-STD-MUA-14_e.pdf?src-supplier=Digi-Key; Supplier Part Number 1: 644-1156-6-ND; LCSC Part Number: C156245
footprint NX3215SA-32.768K-STD-MUA-8_
pins: 1, 2

## NX3215SA-32.768K-STD-MUA-14
designator X?, comment 32.7680KHZ
CRYSTAL 32.7680KHZ 6PF SMD; Manufacturer: NDK; Manufacturer Part Number: NX3215SA-32.768K-STD-MUA-14; Frequency: 32.768kHz; Frequency Tolerance: 20ppm; ESR (Equivalent Series Resistance): 70kR; Supplier 1: Rs; RoHS: Yes; Category: Crystals; Stock 1: 500; Pricing 1: 5=0.15520, 50=0.68600, 100=0.66600, 250=0.65000, 500=0.63400 (GBP); Mounting Technology: Surface Mount; Case/Package: SMD/SMT; Min Operating Temperature: -40°C; Max Operating Temperature: 85°C; Packaging: Cut Tape; Load Capacitance: 6pF; Series: NX3215SA; RoHS Compliant: Yes; ComponentLink1URL: https://datasheet.ciiva.com/6733/c-nx3215sa-std-mua-9-e-6733110.pdf?src-supplier=Digi-Key; ComponentLink1Description: https://datasheet.ciiva.com/6733/c-nx3215sa-std-mua-9-e-6733110.pdf?src-supplier=Digi-Key; ComponentLink2URL: https://datasheet.ciiva.com/6733/c-nx3215sa-std-mua-9-e-6733111.pdf?src-supplier=Digi-Key; ComponentLink2Description: https://datasheet.ciiva.com/6733/c-nx3215sa-std-mua-9-e-6733111.pdf?src-supplier=Digi-Key; ComponentLink3URL: https://datasheet.ciiva.com/6733/c-nx3215sa-std-mua-9-e-6733112.pdf?src-supplier=Digi-Key; ComponentLink3Description: https://datasheet.ciiva.com/6733/c-nx3215sa-std-mua-9-e-6733112.pdf?src-supplier=Digi-Key; Supplier Part Number 1: 1847854; LCSC Part Number: C156244; Item Type: Crystal
footprint NX3215SA-32.768K-STD-MUA-8_
pins: 1 OSC1, 2 OSC2

## NX3225GA-25MHZ-STD-CRG-2
designator X?, comment 25MHZ
SMD3225-4P Crystals ROHS; Manufacturer: NDK; Manufacturer Part Number: NX3225GA-25MHZ-STD-CRG-2; Package: SMD3225-4P; LCSC Part Number: C438901; Item Type: Crystal; ComponentLink1Description: LCSC; ComponentLink1URL: https://www.lcsc.com/product-detail/Crystals_NDK-NX3225GA-25MHZ-STD-CRG-2_C438901.html
footprint NX3225GA-25MHZ-STD-CRG-2
pins: 1 OSC1, 2 GND, 3 OSC2, 4 OSC3

## OCV181M1CTR-0812
designator C?, comment 180uF
16V 180uF ±20% 16mΩ@100kHz 4.36A@100kHz SMD,8x12mm Solid Capacitors ROHS; Manufacturer: Lelon; Manufacturer Part Number: OCV181M1CTR-0812; LCSC Part Number: C134856; Package: SMD,8x12mm; Item Type: Capacitor; ComponentLink1Description: LCSC; ComponentLink1URL: https://www.lcsc.com/product-detail/Solid-Capacitors_Lelon-OCV181M1CTR-0812_C134856.html
footprint OCV181M1CTR-0812
pins: 1, 2

## OLED 0.96" inch i2C
designator OLED?
0.96 Inch OLED SSD1306 White/Blue/Yellow 128X64 IIC I2C Serial Display Module 12864 LCD Screen Board For Arduino; Manufacturer: TENSTAR ROBOT; Manufacturer Part Number: OLED 0.96" inch i2C; Item Type: OLED Module; Package: Custom; ComponentLink1Description: Aliexpress; ComponentLink1URL: https://vi.aliexpress.com/item/32643950109.html?gatewayAdapt=glo2vnm
footprint OLED 0.96" inch i2C
pins: 1 GND, 2 VCC, 3 SCL, 4 SDA

## OPA344NA/250
designator U?
IC OPAMP GP 1 CIRCUIT SOT23-5; Manufacturer: Texas Instruments; Manufacturer Part Number: OPA344NA/250; Nominal Supply Current: 250uA; Bandwidth: 1MHz; Min Supply Voltage: 2.7V; Max Supply Voltage: 5.5V; Voltage Gain: 122dB; Common Mode Rejection Ratio: 76dB; Number of Channels: 1; Slew Rate: 0.8V/µs; Max I/O Voltage: 1mV; Input Bias Current: 10pA; Power Supply Rejection Ratio (PSRR): 90.46dB; Output Current per Channel: 15mA; Quiescent Current: 250mA; Supplier 1: Digi-Key; Stock 1: 6132; Pricing 1: 1=1.59, 10=1.43, 25=1.3492, 100=1.0794 (USD); Case/Package: SOT-23; Number of Pins: 5; Min Operating Temperature: -40°C; Max Operating Temperature: 85°C; Packaging: Tape and Reel; Package Quantity: 250; Unity Gain Bandwidth Product: 1MHz; Input Offset Voltage (Vos): 1mV; Gain Bandwidth Product: 1MHz; Number of Circuits: 1; Number of Amplifiers: 1; Number of Elements: 1; Length: 2.9mm; Height: 1.15mm; Width: 1.6mm; Radiation Hardening: No; REACH SVHC: No SVHC; Lead Free: Lead Free; ComponentLink1URL: http://www.ti.com/general/docs/lit/getliterature.tsp?genericPartNumber=OPA344&fileType=pdf&src-supplier=Newark; ComponentLink1Description: http://www.ti.com/general/docs/lit/getliterature.tsp?genericPartNumber=OPA344&fileType=pdf&src-supplier=Newark; ComponentLink2URL: http://www.farnell.com/datasheets/1882856.pdf?src-supplier=Element14; ComponentLink2Description: http://www.farnell.com/datasheets/1882856.pdf?src-supplier=Element14; ComponentLink3URL: http://www.ti.com/lit/ds/symlink/opa344.pdf?src-supplier=Digi-Key; ComponentLink3Description: http://www.ti.com/lit/ds/symlink/opa344.pdf?src-supplier=Digi-Key; ComponentLink4URL: http://focus.ti.com/lit/ds/symlink/opa344.pdf?src-supplier=Avnet+Europe; ComponentLink4Description: http://focus.ti.com/lit/ds/symlink/opa344.pdf?src-supplier=Avnet+Europe; ComponentLink5URL: http://www.ti.com/general/docs/lit/getliterature.tsp?genericPartNumber=OPA4345&&fileType=pdf&src-supplier=Avnet; ComponentLink5Description: http://www.ti.com/general/docs/lit/getliterature.tsp?genericPartNumber=OPA4345&&fileType=pdf&src-supplier=Avnet; Supplier Part Number 1: OPA344NACT-ND; LCSC Part Number: C131974; Item Type: IC
footprint SOT-23-5
pins: 1 OUT, 2 V- (power), 3 IN+, 4 IN-, 5 V+ (power)

## OR-3H7B-TP-G
designator U?
80V 3750V 2us@2mA,100Ω -55℃~+125℃ 50mA 3us@2mA,100Ω 0.4V@2.4mA,8mA 1 6V 1.2V Phototransistor DC SOP-4-2.6mm Optocouplers - Phototransistor Output ROHS; Manufacturer: Orient; Manufacturer Part Number: OR-3H7B-TP-G; Package: SOP-4-2.6mm; LCSC Part Number: C282477; Item Type: Optocoupler; ComponentLink1Description: LCSC; ComponentLink1URL: https://www.lcsc.com/product-detail/Optocouplers-Phototransistor-Output_Orient-OR-3H7B-TP-G_C282477.html
footprint SOP-4-1.27mm pitch Body 2.6mm
pins: 1 An, 2 Ca, 3 E, 4 C

## ORZ471M1CBK-0812
designator C?, comment 470uF
Cap Alum 470UF 16V 20% 2000LHRS 8 X 12; Manufacturer: Lelon; Manufacturer Part Number: ORZ471M1CBK-0812; Item Type: Capacitor; Supplier 1: Mouser; RoHS: Yes; Category: Uncategorized; Case/Package: Aluminum; Min Operating Temperature: -55°C; Max Operating Temperature: 105°C; Value: 470uF; Package Quantity: 500; Packaging: Bulk; Voltage Rating: 16V; Voltage Rating (DC): 16V; Tolerance: 20%; Termination: Radial; Length: 12mm; Lead Pitch: 3.5mm; ComponentLink1URL: http://www.lelon.com.tw/down.php?f=/file/3.pdf&n=OCRZ.pdf&src-supplier=Mouser; ComponentLink1Description: http://www.lelon.com.tw/down.php?f=/file/3.pdf&n=OCRZ.pdf&src-supplier=Mouser; Supplier Part Number 1: 140-ORZ471M1CBK0812; LCSC Part Number: C311633
footprint ORZ471M1CBK-0812
pins: 1, 2

## PA1206FRF470R02L
designator R?, comment 20mR
RES 0.02 OHM 1% 1W 1206; Manufacturer: Yageo; Manufacturer Part Number: PA1206FRF470R02L; Item Type: Resistor; Supplier: Avnet; Supplier Part Number: 58AK7653; RoHS: No; Category: Chip SMD Resistors; Stock: 4000; Pricing: 1=0.541 (USD); LCSC Part Number: C728292
footprint Res-1206
pins: 1, 2

## PA2512FKF7T0R002E
designator R?, comment 2mR
RES 0.002 OHM 1% 3W 2512; Manufacturer: Yageo; Manufacturer Part Number: PA2512FKF7T0R002E; Temperature Coefficient: 100ppm/°C; Item Type: Resistor; Supplier 1: Mouser; RoHS: Yes; Category: Chip SMD Resistors; Stock 1: 5437; Pricing 1: 1=0.78000, 10=0.67800, 50=0.52800, 100=0.45900, 1000=0.29400, 10000=0.29400 (USD); Case/Package: 2512; Min Operating Temperature: -55°C; Max Operating Temperature: 170°C; Package Quantity: 4000; Packaging: Tape and Reel; Resistance: 2mR; Resistor Type: Thin Film; Number of Terminations: 2; Tolerance: 1%; Max Power Dissipation: 3W; Features: Moisture Resistant,Automotive AEC-Q200; Length: 0.25inch; Width: 0.125inch; Height: 0.035inch; RoHS Compliant: Yes; ComponentLink1URL: http://www.mouser.com/ds/2/447/PYu-PA_E_51_RoHS_5-1077983.pdf?src-supplier=Mouser; ComponentLink1Description: http://www.mouser.com/ds/2/447/PYu-PA_E_51_RoHS_5-1077983.pdf?src-supplier=Mouser; ComponentLink2URL: http://www.yageo.com/documents/recent/PYu-PA_E_51_RoHS_7.pdf?src-supplier=Digi-Key; ComponentLink2Description: http://www.yageo.com/documents/recent/PYu-PA_E_51_RoHS_7.pdf?src-supplier=Digi-Key; Supplier Part Number 1: 603-PA2512FKF7T0R002; LCSC Part Number: C728320
footprint RES-2512
pins: 1, 2

## PAC5527QMST
designator U?
Motor/Motion/Ignition Controllers & Drivers 48V ChargePumpMotor ContDriver 10.8V-24V; Manufacturer: Qorvo; Manufacturer Part Number: PAC5527QMST; Item Type: IC; Supplier 1: Avnet; RoHS: No; Pricing 1: 100=4.78000 (USD); Supplier Part Number 1: PAC5527QMST; Supplier 2: Mouser; Category: Uncategorized; Stock 2: 1; Pricing 2: 1=156.25000, 10=156.25000, 50=156.25000, 100=156.25000, 1000=156.25000, 10000=156.25000 (USD); Supplier Part Number 2: 107-PAC5527EVK1
footprint 48-QFN (6x6)_
pins: 1 PF2, 2 PF1, 3 PF0, 4 VCC33, 5 VSS, 6 AIO0, 7 AIO1, 8 AIO2, 9 AIO3, 10 AIO4, 11 AIO5, 12 AIO6, 13 AIO7, 14 AIO8, 15 AIO9, 16 VSYS, 17 VM, 18 SW1, 19 SW2, 20 VP, 21 CPL, 22 CPH, 23 DRL0, 24 DRL1, 25 DRL2, 26 DRS0, 27 DRH0, 28 DRS1, 29 DRH1, 30 DRS2, 31 DRH2, 32 VCP, 33 PD7, 34 PD6, 35 PD5, 36 PD4, 37 PE0, 38 PE1, 39 PE2, 40 PE3, 41 VCC18, 42 VCORE, 43 VCCIO, 44 PF7/ADC7, 45 PF6/ADC6, 46 PF5/ADC5, 47 PF4/ADC4, 48 PF3, 49 GND

## PAJ7620U2
designator U?
Integrated Gesture Recognition Sensor with I2C Interface; Manufacturer: PixART Imaging Inc.; Manufacturer Part Number: PAJ7620U2; Item Type: IC; Package: *
footprint PAJ7620U2
pins: 1 VBUS, 2 I2C_SDA, 3 INT, 4 TESTMD, 5 I2C_SCL, 6 GND, 7 GPIO3, 8 GPIO2, 9 GPIO1, 10 GND, 11 VLED, 12 VDD, 13 GPIO0

## PAM8006ATR
designator U?
IC AMP AUDIO 15W CLASS D 32UQFN; Manufacturer: Diodes; Manufacturer Part Number: PAM8006ATR; Voltage Gain: 32dB; Min Supply Voltage: 8V; Max Supply Voltage: 18V; Max Output Power: 10W; Power Supply Rejection Ratio (PSRR): 65dB; Supplier 1: Rs; RoHS: Yes; Category: Amplifiers - Audio; Stock 1: 596; Pricing 1: 2=2.11500 (GBP); Mounting Technology: Surface Mount; Case/Package: QFN; Pins: 32; Min Operating Temperature: -20°C; Max Operating Temperature: 85°C; Packaging: Tape and Reel; Package Quantity: 3000; Series: -; Length: 5mm; Width: 5mm; Height: 0.75mm; Radiation Hardening: No; Lead Free: Lead Free; RoHS Compliant: Yes; ComponentLink1URL: https://datasheet.ciiva.com/24013/pam8006a-247273-24013164.pdf?src-supplier=Mouser; ComponentLink1Description: https://datasheet.ciiva.com/24013/pam8006a-247273-24013164.pdf?src-supplier=Mouser; ComponentLink2URL: https://datasheet.ciiva.com/29896/pam8006a-29896322.pdf?src-supplier=Avnet; ComponentLink2Description: https://datasheet.ciiva.com/29896/pam8006a-29896322.pdf?src-supplier=Avnet; ComponentLink3URL: https://datasheet.ciiva.com/30481/0900766b81268cf3-30481630.pdf?src-supplier=Rs; ComponentLink3Description: https://datasheet.ciiva.com/30481/0900766b81268cf3-30481630.pdf?src-supplier=Rs; Supplier Part Number 1: 7902950; LCSC Part Number: C167118; Item Type: IC
footprint 32-QFN (32pins, 5x5mm body, 0.5mm pitch QFN package)
pins: 1 NC, 2 RINN, 3 RINP, 4 MUTE, 5 AVDD, 6 LINP, 7 LINN, 8 NC, 9 PGNDL, 10 PVCCL, 11 LOUTN, 12 BSLN, 13 BSLP, 14 LOUTP, 15 PVCCL, 16 PGNDL, 17 NC, 18 PL, 19 V2P5, 20 AGND, 21 VCLAMP, 22 AVCC, 23 ~{SD}, 24 NC, 25 PGNDR, 26 PVCCR, 27 ROUTP, 28 BSRP, 29 BSRN, 30 ROUTN, 31 PVCCR, 32 PGNDR, 33 GND

## PAM8403
designator U?
SOP-16 Audio Power OpAmps ROHS; Manufacturer: Slkor; Manufacturer Part Number: PAM8403; Item Type: IC; Package: SOP-16; LCSC Part Number: C5122557; ComponentLink1Description: LCSC; ComponentLink1URL: https://www.lcsc.com/product-detail/Audio-Power-OpAmps_Slkor-SLKORMICRO-Elec-PAM8403_C5122557.html
footprint SOP-16_150mil
pins: 1 OUTL+, 2 PGND, 3 OUTL-, 4 PVDD, 5 ~{MUTE}, 6 VDD, 7 INL, 8 VREF, 9 NC, 10 INR, 11 GND, 12 ~{SHDN}, 13 PVDD, 14 OUTR-, 15 PGND, 16 OUTR+

## PCA9306DCUR
designator U?
IC TRNSLTR BIDIRECTIONAL 8VSSOP; Manufacturer: Texas Instruments; Manufacturer Part Number: PCA9306DCUR; Propagation Delay: 1.4ns; Min Supply Voltage: 0uV; Max Supply Voltage: 5V; Number of Channels: 2; Logic Function: Translator; Turn-On Delay Time: 1.2ns; Output Type: I2C; Output Current: 64mA; Supplier 1: Digi-Key; RoHS: Yes; Category: Voltage Level Shifters; Pricing 1: 1=0.92000, 10=0.82600, 25=0.78360, 100=0.64360, 250=0.60164, 500=0.53170, 1000=0.46200 (USD); Case/Package: VSSOP; Number of Pins: 8; Weight: 0.000339oz; Contact Plating: Gold; Min Operating Temperature: -40°C; Max Operating Temperature: 85°C; Packaging: Tape and Reel; Package Quantity: 1; Number of Outputs: 2; Number of Bits: 2; Number of Inputs: 2; Termination: SMD/SMT; Length: 2.3mm; Width: 2mm; Height: 0.85mm; Radiation Hardening: No; Lead Free: Lead Free; RoHS Compliant: Yes; REACH SVHC: No SVHC; ComponentLink1URL: https://datasheet.ciiva.com/36526/2030035-36526265.pdf?src-supplier=Jameco; ComponentLink1Description: https://datasheet.ciiva.com/36526/2030035-36526265.pdf?src-supplier=Jameco; ComponentLink2URL: https://datasheet.ciiva.com/1508/1815321-1508635.pdf?src-supplier=Element14; ComponentLink2Description: https://datasheet.ciiva.com/1508/1815321-1508635.pdf?src-supplier=Element14; ComponentLink3URL: https://datasheet.ciiva.com/1508/1862428-1508795.pdf?src-supplier=Element14; ComponentLink3Description: https://datasheet.ciiva.com/1508/1862428-1508795.pdf?src-supplier=Element14; ComponentLink4URL: https://datasheet.ciiva.com/1899/pca9306-1899330.pdf?src-supplier=Digi-Key; ComponentLink4Description: https://datasheet.ciiva.com/1899/pca9306-1899330.pdf?src-supplier=Digi-Key; ComponentLink5URL: https://datasheet.ciiva.com/1899/pca9306-1899329.pdf?src-supplier=Digi-Key; ComponentLink5Description: https://datasheet.ciiva.com/1899/pca9306-1899329.pdf?src-supplier=Digi-Key; ComponentLink6URL: https://datasheet.ciiva.com/1899/pca9306-1899331.pdf?src-supplier=Digi-Key; ComponentLink6Description: https://datasheet.ciiva.com/1899/pca9306-1899331.pdf?src-supplier=Digi-Key; ComponentLink7URL: https://datasheet.ciiva.com/14287/pca9306-14287462.pdf?src-supplier=Avnet; ComponentLink7Description: https://datasheet.ciiva.com/14287/pca9306-14287462.pdf?src-supplier=Avnet; Supplier Part Number 1: 296-17988-6-ND; LCSC Part Number: C33196; Item Type: IC
footprint VSSOP-8(2x2.3x0.5)
pins: 1 GND, 2 VREF1, 3 SCL1, 4 SDA1, 5 SDA2, 6 SCL2, 7 VREF2, 8 EN

## PCA9536D
designator U?
4 400kHz I²C, SMBus SOIC-8 I/O Expanders ROHS; Manufacturer Part Number: PCA9536D; Manufacturer: NXP Semicon; Item Type: IC; Package: SOIC-8; LCSC Part Number: C129522; ComponentLink1Description: LCSC; ComponentLink1URL: https://www.lcsc.com/product-detail/I-O-Expanders_NXP-Semicon-PCA9536D_C129522.html
footprint SOIC-8
pins: 1 IO0, 2 IO1, 3 IO2, 4 VSS, 5 IO3, 6 SCL, 7 SDA, 8 VDD

## PCA9554PW,118
designator U?
IC XPND 400KHZ I2C SMBUS 16TSSOP; Manufacturer: NXP Semiconductors; Manufacturer Part Number: PCA9554PW,118; Operating Supply Voltage: 5.5V; Interface: I2C,SMBus,Serial; Output Current: 50mA; Number of I/Os: 8; Max Power Dissipation: 200mW; Supply Current: 85mA; Supplier 1: Arrow Electronics; RoHS: Yes; Category: Interface ICs; Stock 1: 2078; Pricing 1: 1=1.9645, 10=1.7652, 25=1.6513, 100=1.3844, 250=1.3012, 500=1.1353, 1000=0.9769, 3000=1.0752, 6000=1.0645 (USD); Mounting Technology: Surface Mount; Case/Package: TSSOP; Pins: 16; Weight: 0.006102oz; Min Operating Temperature: -40°C; Max Operating Temperature: 85°C; Package Quantity: 1; Packaging: Tape and Reel; Frequency: 400kHz; Clock Frequency: 400kHz; Series: -; Nominal Supply Voltage: 5.5V; Radiation Hardening: No; Lead Free: Lead Free; RoHS Compliant: Yes; ComponentLink1URL: https://datasheet.ciiva.com/1780/pca9554-9554a-1780021.pdf?src-supplier=Digi-Key; ComponentLink1Description: https://datasheet.ciiva.com/1780/pca9554-9554a-1780021.pdf?src-supplier=Digi-Key; ComponentLink2URL: https://datasheet.ciiva.com/3149/75016535-3149797.pdf?src-supplier=Avnet; ComponentLink2Description: https://datasheet.ciiva.com/3149/75016535-3149797.pdf?src-supplier=Avnet; ComponentLink3URL: https://datasheet.ciiva.com/1780/pca9554-9554a-1780022.pdf?src-supplier=Digi-Key; ComponentLink3Description: https://datasheet.ciiva.com/1780/pca9554-9554a-1780022.pdf?src-supplier=Digi-Key; ComponentLink4URL: https://datasheet.ciiva.com/1780/pca9554-9554a-1780023.pdf?src-supplier=Digi-Key; ComponentLink4Description: https://datasheet.ciiva.com/1780/pca9554-9554a-1780023.pdf?src-supplier=Digi-Key; ComponentLink5URL: https://datasheet.ciiva.com/3148/75016535-3148509.pdf?src-supplier=Avnet; ComponentLink5Description: https://datasheet.ciiva.com/3148/75016535-3148509.pdf?src-supplier=Avnet; Supplier Part Number 1: PCA9554PW,118; LCSC Part Number: C17230; Item Type: IC
footprint 16-TSSOP (0.173", 4.40mm Width)
pins: 1 A0, 2 A1, 3 A2, 4 IO0 0, 5 IO0 1, 6 IO0 2, 7 IO0 3, 8 VSS, 9 IO0 4, 10 IO0 5, 11 IO0 6, 12 IO0 7, 13 ~{INT}, 14 SCL, 15 SDA, 16 VDD